# Altium footprint library SamacSys.PcbLib: 70 footprints (part 2 of 5)
Each footprint in its own frame and in the unit in brackets; x right, y up, seen from the top. Pads: shape width x height; smd on the part's side, far side on the other; paste and mask are expansions set on the pad; w line width, h text height; cw(c..) or ccw(c..) is an arc to the next point about the centre after c.
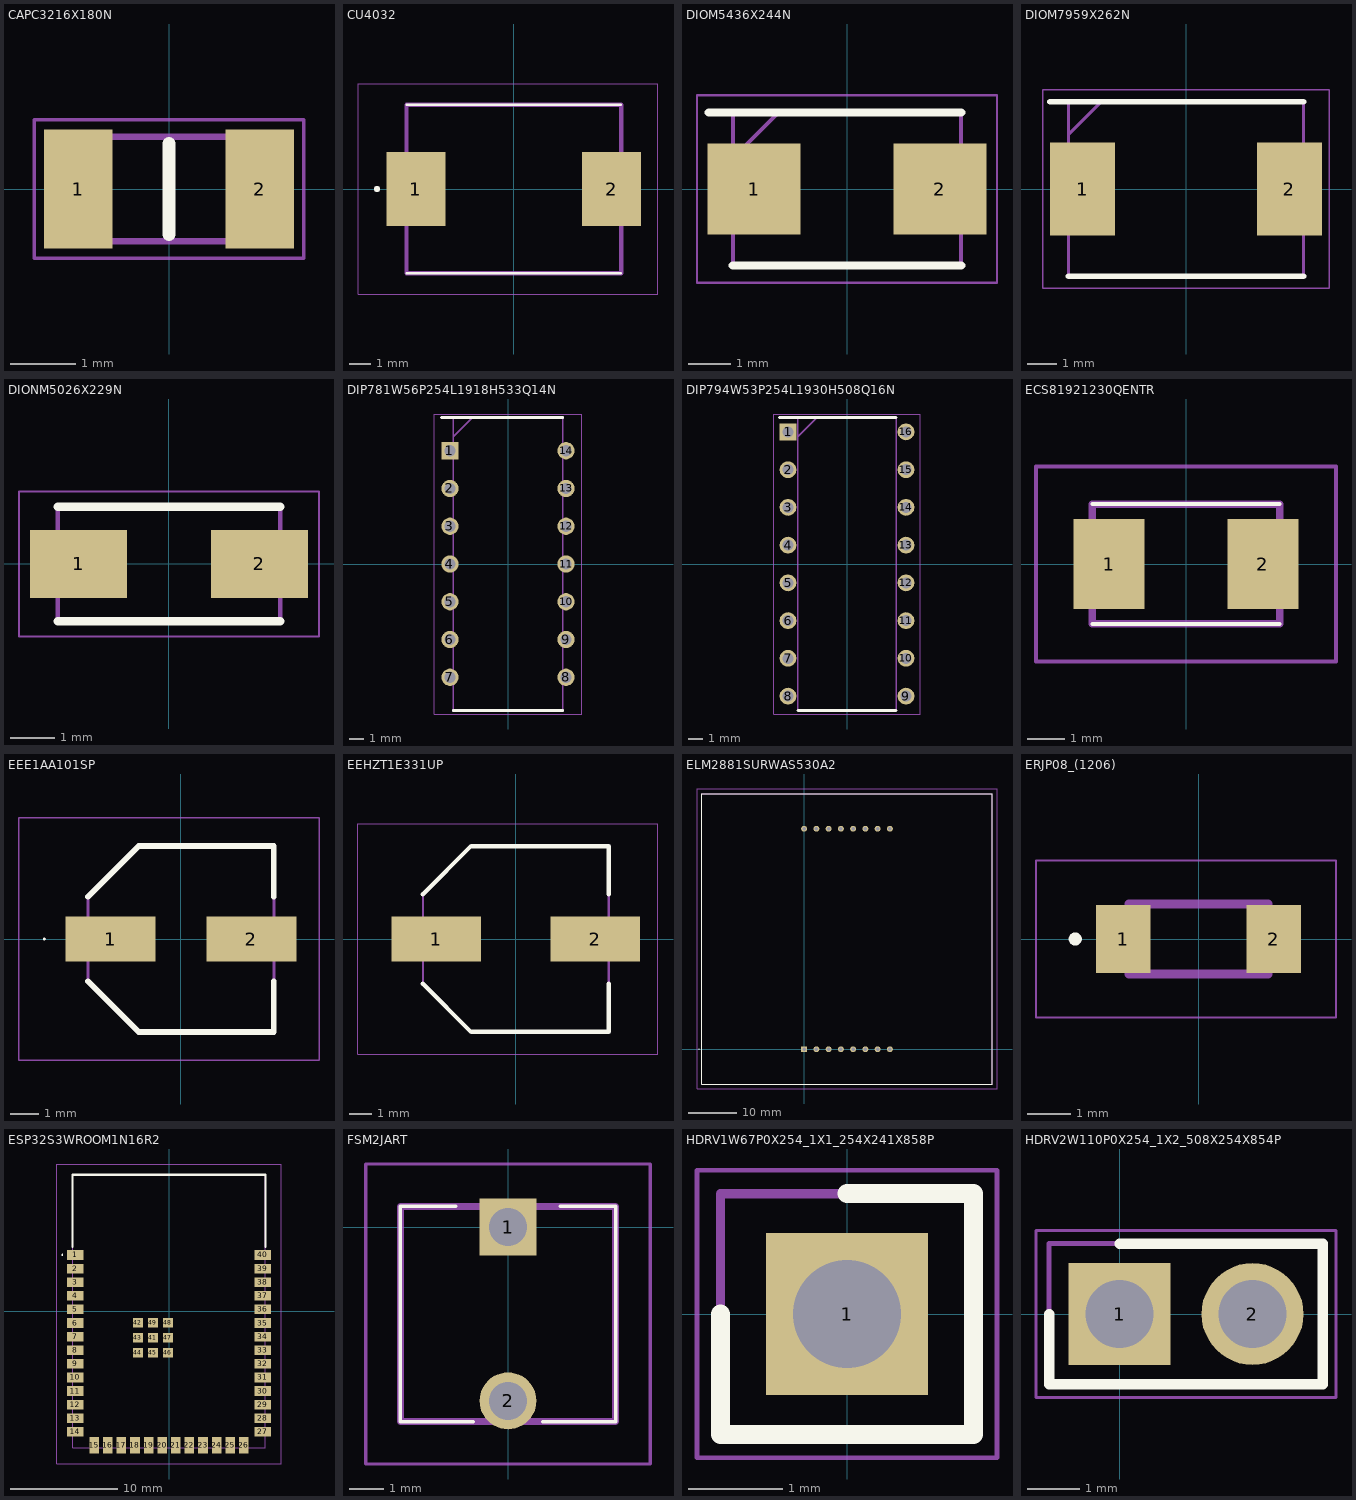
[diagram p1: the footprints below, top view; thin cyan lines are the x and y axes]

## CAPC3216X180N [mm]
pads (2):
  rect 1.05x1.82 smd: 1(-1.39,0) 2(1.39,0)
Top Overlay:
  lines w0.2: 0,-0.7 0,0.7
Mechanical 13:
  lines w0.1: -1.6,-0.8 -1.6,0.8 1.6,0.8 1.6,-0.8 -1.6,-0.8
Mechanical 15:
  lines w0.05: -2.065,-1.06 -2.065,1.06 2.065,1.06 2.065,-1.06 -2.065,-1.06
3D body "CL31B106KBHNNNE.stp": height 1.8, standoff 0, extent -1.6,-0.8 1.6,0.8

## CU4032 [mm]
pads (2):
  rect 2.8x3.5 smd: 1(-4.65,0) 2(4.65,0)
Top Overlay:
  circle w0.2: c-6.5,0 r0.05
  lines w0.1: -5.1,-4 5.1,-4 ; -5.1,4 5.1,4
Mechanical 13:
  lines w0.2: -5.1,-4 -5.1,4 5.1,4 5.1,-4 -5.1,-4
Mechanical 15:
  lines w0.05: -7.4,-5 -7.4,5 6.85,5 6.85,-5 -7.4,-5
3D body "B72660M0301K072.stp": height 3.46, standoff 0, extent -5.151,-4 5.151,4

## DIOM5436X244N [mm]
pads (2):
  rect 2.2x2.15 smd: 1(-2.2,0) 2(2.2,0)
Top Overlay:
  lines w0.2: -3.275,1.81 2.7,1.81 ; -2.7,-1.81 2.7,-1.81
Mechanical 13:
  lines w0.1: -2.7,0.735 -1.625,1.81 ; -2.7,-1.81 -2.7,1.81 2.7,1.81 2.7,-1.81 -2.7,-1.81
Mechanical 15:
  lines w0.05: -3.55,-2.22 -3.55,2.22 3.55,2.22 3.55,-2.22 -3.55,-2.22
3D body "SMBJ15A.stp": height 2.44, standoff 0, extent -2.7,-1.81 2.7,1.81

## DIOM7959X262N [mm]
pads (2):
  rect 2.2x3.15 smd: 1(-3.5,0) 2(3.5,0)
Top Overlay:
  lines w0.2: -4.6,2.952 3.97,2.952 ; -3.97,-2.952 3.97,-2.952
Mechanical 13:
  lines w0.1: -3.97,1.852 -2.87,2.952 ; -3.97,-2.952 -3.97,2.952 3.97,2.952 3.97,-2.952 -3.97,-2.952
Mechanical 15:
  lines w0.05: -4.85,-3.36 -4.85,3.36 4.85,3.36 4.85,-3.36 -4.85,-3.36
3D body "SS34-E3_57T.stp": height 2.67, standoff 0, extent -3.556,-3.112 3.556,3.112

## DIONM5026X229N [mm]
pads (2):
  rect 2.2x1.55 smd: 1(-2.05,0) 2(2.05,0)
Top Overlay:
  lines w0.2: -2.52,-1.298 2.52,-1.298 ; -2.52,1.298 2.52,1.298
Mechanical 13:
  lines w0.1: -2.52,-1.298 -2.52,1.298 2.52,1.298 2.52,-1.298 -2.52,-1.298
Mechanical 15:
  lines w0.05: -3.4,-1.645 -3.4,1.645 3.4,1.645 3.4,-1.645 -3.4,-1.645
3D body "SMAJ5.0CA.stp": height 2.29, standoff 0, extent -2.52,-1.298 2.52,1.298

## DIP781W56P254L1918H533Q14N [mm]
pads (14):
  rect 1.159x1.159 hole 0.759: 1(-3.905,7.62)
  round 1.159 hole 0.759: 2(-3.905,5.08) 3(-3.905,2.54) 4(-3.905,0) 5(-3.905,-2.54) 6(-3.905,-5.08) 7(-3.905,-7.62) 8(3.905,-7.62) 9(3.905,-5.08) 10(3.905,-2.54) 11(3.905,0) 12(3.905,2.54) 13(3.905,5.08) 14(3.905,7.62)
Top Overlay:
  lines w0.2: -4.485,9.842 3.683,9.842 ; -3.683,-9.842 3.683,-9.842
Mechanical 13:
  lines w0.1: -3.683,8.572 -2.413,9.842 ; -3.683,-9.842 -3.683,9.842 3.683,9.842 3.683,-9.842 -3.683,-9.842
Mechanical 15:
  lines w0.05: -4.957,-10.092 -4.957,10.092 4.957,10.092 4.957,-10.092 -4.957,-10.092
3D body "PIC16F18426-I_P.stp": height 5.33, standoff -3.5, extent -4.045,-9.588 4.045,9.588

## DIP794W53P254L1930H508Q16N [mm]
pads (16):
  rect 1.13x1.13 hole 0.73: 1(-3.97,8.89)
  round 1.13 hole 0.73: 2(-3.97,6.35) 3(-3.97,3.81) 4(-3.97,1.27) 5(-3.97,-1.27) 6(-3.97,-3.81) 7(-3.97,-6.35) 8(-3.97,-8.89) 9(3.97,-8.89) 10(3.97,-6.35) 11(3.97,-3.81) 12(3.97,-1.27) 13(3.97,1.27) 14(3.97,3.81) 15(3.97,6.35) 16(3.97,8.89)
Top Overlay:
  lines w0.2: -4.535,9.845 3.3,9.845 ; -3.3,-9.845 3.3,-9.845
Mechanical 13:
  lines w0.1: -3.3,8.575 -2.03,9.845 ; -3.3,-9.845 -3.3,9.845 3.3,9.845 3.3,-9.845 -3.3,-9.845
Mechanical 15:
  lines w0.05: -4.945,-10.095 -4.945,10.095 4.945,10.095 4.945,-10.095 -4.945,-10.095
3D body "SN74HC595NE4.stp": height 5.27, standoff -3.1, extent -3.937,-9.842 3.937,9.842

## ECS81921230QENTR [mm]
pads (2):
  rect 1.9x2.4 smd: 1(-2.05,0) 2(2.05,0)
Top Overlay:
  lines w0.1: -2.5,-1.6 2.5,-1.6 ; -2.5,1.6 2.5,1.6
Mechanical 13:
  lines w0.2: -2.5,-1.6 -2.5,1.6 2.5,1.6 2.5,-1.6 -2.5,-1.6
Mechanical 15:
  lines w0.1: -4,-2.6 -4,2.6 4,2.6 4,-2.6 -4,-2.6
3D body "ECS-81.92-12-30Q-EN-TR.stp": height 1.1, standoff 0, extent -2.54,-1.6 2.5,1.6

## EEE1AA101SP [mm]
pads (2):
  rect 3.2x1.6 smd: 1(-2.5,0) 2(2.5,0)
Top Overlay:
  lines w0.05: -4.875,0 cw(c-4.85,0) -4.825,0 cw(c-4.85,0) -4.875,0
  lines w0.2: -3.3,-1.5 -1.5,-3.3 3.3,-3.3 3.3,-1.5 ; -3.3,1.5 -1.5,3.3 3.3,3.3 3.3,1.5
Mechanical 13:
  lines w0.1: -3.3,1.5 -1.5,3.3 ; -3.3,1.5 -3.3,-1.5 -1.5,-3.3 3.3,-3.3 3.3,3.3 -1.5,3.3 ; -3.3,1.5 -1.5,3.3
Mechanical 15:
  lines w0.05: -5.75,-4.3 -5.75,4.3 4.9,4.3 4.9,-4.3 -5.75,-4.3
3D body "EEE-FK1C101P.stp": height 5.8, standoff 0, extent -3.65,-3.3 3.65,3.3

## EEHZT1E331UP [mm]
pads (2):
  rect 4x2 smd: 1(-3.55,0) 2(3.55,0)
Top Overlay:
  lines w0.2: -4.15,-2 -2,-4.15 4.15,-4.15 4.15,-2 ; -4.15,2 -2,4.15 4.15,4.15 4.15,2
Mechanical 13:
  lines w0.1: -4.15,2 -2,4.15 ; -4.15,2 -4.15,-2 -2,-4.15 4.15,-4.15 4.15,4.15 -2,4.15 ; -4.15,2 -2,4.15
Mechanical 15:
  lines w0.05: -7.05,-5.15 -7.05,5.15 6.35,5.15 6.35,-5.15 -7.05,-5.15
3D body "EEE-FK1V101P.stp": height 10.2, standoff 0, extent -4.79,-4.15 4.91,4.15

## ELM2881SURWAS530A2 [mm]
pads (16):
  rect 1.217x1.217 hole 0.71: 1(0,0)
  round 1.217 hole 0.71: 2(2.54,0) 3(5.08,0) 4(7.62,0) 5(10.16,0) 6(12.7,0) 7(15.24,0) 8(17.78,0) 9(17.78,45.72) 10(15.24,45.72) 11(12.7,45.72) 12(10.16,45.72) 13(7.62,45.72) 14(5.08,45.72) 15(2.54,45.72) 16(0,45.72)
Top Overlay:
  lines w0.1: -21.8,0 ccw(c-21.75,0) -21.7,0 ccw(c-21.75,0) -21.8,0
  lines w0.2: -21.21,-7.24 -21.21,52.96 38.99,52.96 38.99,-7.24 -21.21,-7.24
Mechanical 13:
  lines w0.1: -21.21,-7.24 -21.21,52.96 38.99,52.96 38.99,-7.24 -21.21,-7.24
Mechanical 15:
  lines w0.1: -22.21,-8.24 -22.21,53.96 39.99,53.96 39.99,-8.24 -22.21,-8.24
3D body "ELM-2881SURWA_S530-A2.stp": height 9.35, standoff -5, extent -21.21,-7.24 38.99,52.96

## ERJP08_(1206) [mm]
pads (2):
  rect 1.25x1.55 smd: 1(-1.725,0) 2(1.725,0)
Top Overlay:
  circle w0.2: c-2.825,0 r0.05
Mechanical 13:
  lines w0.2: -1.6,-0.8 -1.6,0.8 1.6,0.8 1.6,-0.8 -1.6,-0.8
Mechanical 15:
  lines w0.05: -3.725,-1.8 -3.725,1.8 3.15,1.8 3.15,-1.8 -3.725,-1.8
3D body "ERJ-P08F1004V.stp": height 0.6, standoff 0, extent -1.6,-0.8 1.6,0.8

## ESP32S3WROOM1N16R2 [mm]
pads (49):
  rect 1.5x0.9 smd: 1(-8.75,5.26) 2(-8.75,3.99) 3(-8.75,2.72) 4(-8.75,1.45) 5(-8.75,0.18) 6(-8.75,-1.09) 7(-8.75,-2.36) 8(-8.75,-3.63) 9(-8.75,-4.9) 10(-8.75,-6.17) 11(-8.75,-7.44) 12(-8.75,-8.71) 13(-8.75,-9.98) 14(-8.75,-11.25) 27(8.75,-11.25) 28(8.75,-9.98) 29(8.75,-8.71) 30(8.75,-7.44) 31(8.75,-6.17) 32(8.75,-4.9) 33(8.75,-3.63) 34(8.75,-2.36) 35(8.75,-1.09) 36(8.75,0.18) 37(8.75,1.45) 38(8.75,2.72) 39(8.75,3.99) 40(8.75,5.26)
  rect 0.9x1.5 smd: 15(-6.985,-12.5) 16(-5.715,-12.5) 17(-4.445,-12.5) 18(-3.175,-12.5) 19(-1.905,-12.5) 20(-0.635,-12.5) 21(0.635,-12.5) 22(1.905,-12.5) 23(3.175,-12.5) 24(4.445,-12.5) 25(5.715,-12.5) 26(6.985,-12.5)
  rect 0.9x0.9 smd: 41(-1.5,-2.46) 42(-2.9,-1.06) 43(-2.9,-2.46) 44(-2.9,-3.86) 45(-1.5,-3.86) 46(-0.1,-3.86) 47(-0.1,-2.46) 48(-0.1,-1.06) 49(-1.5,-1.06)
Top Overlay:
  lines w0.1: -10,5.26 ccw(c-9.95,5.26) -9.9,5.26 ccw(c-9.95,5.26) -10,5.26
  lines w0.2: -9,6 -9,12.75 9,12.75 9,6
Mechanical 13:
  lines w0.1: -9,-12.75 -9,12.75 9,12.75 9,-12.75 -9,-12.75
Mechanical 15:
  lines w0.1: -10.5,-14.25 -10.5,13.75 10.5,13.75 10.5,-14.25 -10.5,-14.25
3D body "ESP32-S3-WROOM-1-N16R2.stp": height 3.25, standoff 0, extent -9,-12.75 9,12.75

## FSM2JART [mil]
pads (2):
  rect 64.49x64.49 hole 43: 1(0,0)
  round 64.49 hole 43: 2(0,-197.01)
Top Overlay:
  lines w3.94: -59.06,23.5 -122.01,23.5 -122.01,-220.51 -39.37,-220.51 ; 39.37,-220.51 122.01,-220.51 122.01,23.5 59.06,23.5
Mechanical 13:
  lines w7.87: -122.01,-220.51 -122.01,23.5 122.01,23.5 122.01,-220.51 -122.01,-220.51
Mechanical 15:
  lines w3.94: -161.38,-268.62 -161.38,71.61 161.38,71.61 161.38,-268.62 -161.38,-268.62
3D body "FSM2JART.stp": height 198.94, standoff -512.85, extent -122,-220.43 122,23.57

## HDRV1W67P0X254_1X1_254X241X858P [mm]
pads (1):
  rect 1.725x1.725 hole 1.15: 1(0,0)
Top Overlay:
  lines w0.2: -1.345,0 -1.345,-1.28 1.345,-1.28 1.345,1.28 0,1.28
Mechanical 13:
  lines w0.1: -1.345,-1.28 1.345,-1.28 1.345,1.28 -1.345,1.28 -1.345,-1.28
Mechanical 15:
  lines w0.05: -1.595,-1.53 1.595,-1.53 1.595,1.53 -1.595,1.53 -1.595,-1.53
3D body "68001-101HLF.stp": height 1.21, standoff -1.21, extent -1.27,-3.251 1.27,8.179

## HDRV2W110P0X254_1X2_508X254X854P [mm]
pads (2):
  rect 1.95x1.95 hole 1.3: 1(0,0)
  round 1.95 hole 1.3: 2(2.54,0)
Top Overlay:
  lines w0.2: -1.345,0 -1.345,-1.345 3.885,-1.345 3.885,1.345 0,1.345
Mechanical 13:
  lines w0.1: -1.345,-1.345 3.885,-1.345 3.885,1.345 -1.345,1.345 -1.345,-1.345
Mechanical 15:
  lines w0.05: -1.595,-1.595 4.135,-1.595 4.135,1.595 -1.595,1.595 -1.595,-1.595
3D body "61300211121.stp": height 8.54, standoff -3, extent -1.27,-1.27 3.81,1.27